# Altium footprint library WR-BHD.PcbLib: 220 footprints (part 13 of 14)
Each footprint in its own frame and in the unit in brackets; x right, y up, seen from the top. Pads: shape width x height; smd on the part's side, far side on the other; paste and mask are expansions set on the pad; w line width, h text height; cw(c..) or ccw(c..) is an arc to the next point about the centre after c.
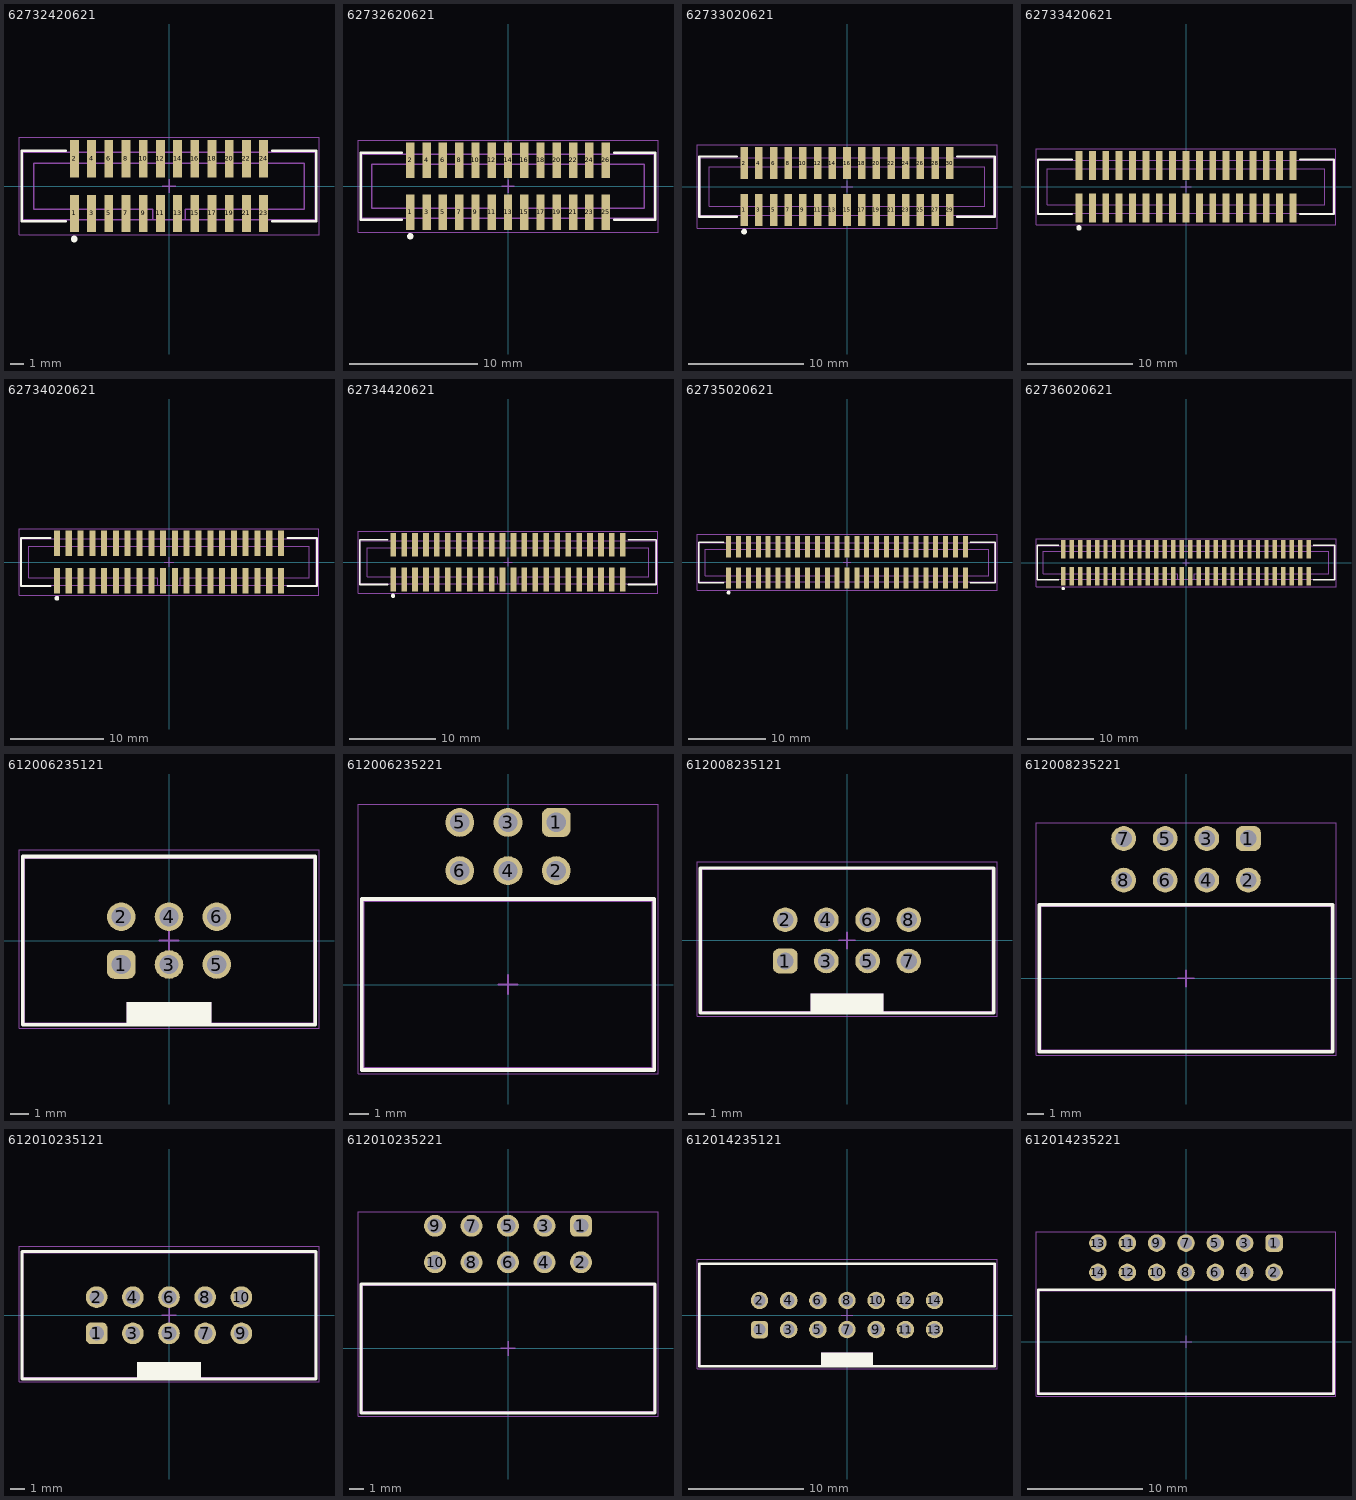
[diagram p12: the footprints below, top view; thin cyan lines are the x and y axes]

## 62732420621 [mm] "Boc Header SMT type, 24p"
height 5.3
pads (24):
  rect 0.65x2.76 smd: 1(-6.985,-2.02) 2(-6.985,2.02) 3(-5.715,-2.02) 4(-5.715,2.02) 5(-4.445,-2.02) 6(-4.445,2.02) 7(-3.175,-2.02) 8(-3.175,2.02) 9(-1.905,-2.02) 10(-1.905,2.02) 11(-0.635,-2.02) 12(-0.635,2.02) 13(0.635,-2.02) 14(0.635,2.02) 15(1.905,-2.02) 16(1.905,2.02) 17(3.175,-2.02) 18(3.175,2.02) 19(4.445,-2.02) 20(4.445,2.02) 21(5.715,-2.02) 22(5.715,2.02) 23(6.985,-2.02) 24(6.985,2.02)
Top Overlay:
  circle w0.25: c-6.995,-3.9 r0.125
  lines w0.2: -7.645,-2.6 -10.87,-2.6 -10.87,2.6 -7.645,2.6 ; 7.645,-2.6 10.87,-2.6 10.87,2.6 7.645,2.6
Top Assembly:
  lines w0.1: -1.2,-2.5 -1.2,-1.7 -9.995,-1.7 -9.995,1.7 9.995,1.7 9.995,-1.7 1.2,-1.7 1.2,-2.5 ; -10.795,-2.5 -10.795,2.5 10.795,2.5 10.795,-2.5 -10.795,-2.5
Top Designator:
  text ".Designator" at -3.647,-0.357 h1
Top 3D Body:
  lines w0.1: -1.2,-2.5 -1.2,-1.7 -9.995,-1.7 -9.995,1.7 9.995,1.7 9.995,-1.7 1.2,-1.7 1.2,-2.5 ; -10.795,-2.5 10.795,-2.5 10.795,2.5 -10.795,2.5 -10.795,-2.5
Top Courtyard:
  lines w0.05: -11.07,-3.6 -11.07,3.6 11.07,3.6 11.07,-3.6 -11.07,-3.6
Top Component Center:
  lines w0.1: -0.5,0 0.5,0 ; 0,-0.5 0,0.5
3D body "62732420621.stp": height 5.3, standoff 0, extent -10.795,-2.755 10.795,2.755

## 62732620621 [mm] "Boc Header SMT type, 26p"
height 5.3
pads (26):
  rect 0.65x2.76 smd: 1(-7.62,-2.02) 2(-7.62,2.02) 3(-6.35,-2.02) 4(-6.35,2.02) 5(-5.08,-2.02) 6(-5.08,2.02) 7(-3.81,-2.02) 8(-3.81,2.02) 9(-2.54,-2.02) 10(-2.54,2.02) 11(-1.27,-2.02) 12(-1.27,2.02) 13(0,-2.02) 14(0,2.02) 15(1.27,-2.02) 16(1.27,2.02) 17(2.54,-2.02) 18(2.54,2.02) 19(3.81,-2.02) 20(3.81,2.02) 21(5.08,-2.02) 22(5.08,2.02) 23(6.35,-2.02) 24(6.35,2.02) 25(7.62,-2.02) 26(7.62,2.02)
Top Overlay:
  circle w0.25: c-7.63,-3.9 r0.125
  lines w0.2: -8.28,-2.6 -11.505,-2.6 -11.505,2.6 -8.28,2.6 ; 8.28,-2.6 11.505,-2.6 11.505,2.6 8.28,2.6
Top Assembly:
  lines w0.1: -1.2,-2.5 -1.2,-1.7 -10.63,-1.7 -10.63,1.7 10.63,1.7 10.63,-1.7 1.2,-1.7 1.2,-2.5 ; -11.43,-2.5 -11.43,2.5 11.43,2.5 11.43,-2.5 -11.43,-2.5
Top Designator:
  text ".Designator" at -3.647,-0.357 h1
Top 3D Body:
  lines w0.1: -1.2,-2.5 -1.2,-1.7 -10.63,-1.7 -10.63,1.7 10.63,1.7 10.63,-1.7 1.2,-1.7 1.2,-2.5 ; -11.43,-2.5 11.43,-2.5 11.43,2.5 -11.43,2.5 -11.43,-2.5
Top Courtyard:
  lines w0.05: -11.705,-3.6 -11.705,3.6 11.705,3.6 11.705,-3.6 -11.705,-3.6
Top Component Center:
  lines w0.1: -0.5,0 0.5,0 ; 0,-0.5 0,0.5
3D body "62732620621.stp": height 5.3, standoff 0, extent -11.43,-2.755 11.43,2.755

## 62733020621 [mm] "Boc Header SMT type, 30p"
height 5.3
pads (30):
  rect 0.65x2.76 smd: 1(-8.89,-2.02) 2(-8.89,2.02) 3(-7.62,-2.02) 4(-7.62,2.02) 5(-6.35,-2.02) 6(-6.35,2.02) 7(-5.08,-2.02) 8(-5.08,2.02) 9(-3.81,-2.02) 10(-3.81,2.02) 11(-2.54,-2.02) 12(-2.54,2.02) 13(-1.27,-2.02) 14(-1.27,2.02) 15(0,-2.02) 16(0,2.02) 17(1.27,-2.02) 18(1.27,2.02) 19(2.54,-2.02) 20(2.54,2.02) 21(3.81,-2.02) 22(3.81,2.02) 23(5.08,-2.02) 24(5.08,2.02) 25(6.35,-2.02) 26(6.35,2.02) 27(7.62,-2.02) 28(7.62,2.02) 29(8.89,-2.02) 30(8.89,2.02)
Top Overlay:
  circle w0.25: c-8.9,-3.9 r0.125
  lines w0.2: -9.55,-2.6 -12.775,-2.6 -12.775,2.6 -9.55,2.6 ; 9.55,-2.6 12.775,-2.6 12.775,2.6 9.55,2.6
Top Assembly:
  lines w0.1: -1.2,-2.5 -1.2,-1.7 -11.9,-1.7 -11.9,1.7 11.9,1.7 11.9,-1.7 1.2,-1.7 1.2,-2.5 ; -12.7,-2.5 12.7,-2.5 12.7,2.5 -12.7,2.5 -12.7,-2.5
Top Designator:
  text ".Designator" at -3.647,-0.357 h1
Top 3D Body:
  lines w0.1: -1.2,-2.5 -1.2,-1.7 -11.9,-1.7 -11.9,1.7 11.9,1.7 11.9,-1.7 1.2,-1.7 1.2,-2.5 ; -12.7,-2.5 -12.7,2.5 12.7,2.5 12.7,-2.5 -12.7,-2.5
Top Courtyard:
  lines w0.05: -12.975,-3.6 12.975,-3.6 12.975,3.6 -12.975,3.6 -12.975,-3.6
Top Component Center:
  lines w0.1: -0.5,0 0.5,0 ; 0,-0.5 0,0.5
3D body "62733020621.stp": height 5.3, standoff 0, extent -12.7,-2.755 12.7,2.755

## 62733420621 [mm] "Boc Header SMT type, 34p"
height 5.3
pads (34):
  rect 0.65x2.76 smd: 1(-10.16,-2.02) 2(-10.16,2.02) 3(-8.89,-2.02) 4(-8.89,2.02) 5(-7.62,-2.02) 6(-7.62,2.02) 7(-6.35,-2.02) 8(-6.35,2.02) 9(-5.08,-2.02) 10(-5.08,2.02) 11(-3.81,-2.02) 12(-3.81,2.02) 13(-2.54,-2.02) 14(-2.54,2.02) 15(-1.27,-2.02) 16(-1.27,2.02) 17(0,-2.02) 18(0,2.02) 19(1.27,-2.02) 20(1.27,2.02) 21(2.54,-2.02) 22(2.54,2.02) 23(3.81,-2.02) 24(3.81,2.02) 25(5.08,-2.02) 26(5.08,2.02) 27(6.35,-2.02) 28(6.35,2.02) 29(7.62,-2.02) 30(7.62,2.02) 31(8.89,-2.02) 32(8.89,2.02) 33(10.16,-2.02) 34(10.16,2.02)
Top Overlay:
  circle w0.25: c-10.17,-3.9 r0.125
  lines w0.2: -10.82,-2.6 -14.045,-2.6 -14.045,2.6 -10.82,2.6 ; 10.82,-2.6 14.045,-2.6 14.045,2.6 10.82,2.6
Top Assembly:
  lines w0.1: -1.2,-2.5 -1.2,-1.7 -13.17,-1.7 -13.17,1.7 13.17,1.7 13.17,-1.7 1.2,-1.7 1.2,-2.5 ; -13.97,-2.5 13.97,-2.5 13.97,2.5 -13.97,2.5 -13.97,-2.5
Top Designator:
  text ".Designator" at -3.647,-0.357 h1
Top 3D Body:
  lines w0.1: -1.2,-2.5 -1.2,-1.7 -13.17,-1.7 -13.17,1.7 13.17,1.7 13.17,-1.7 1.2,-1.7 1.2,-2.5 ; -13.97,-2.5 -13.97,2.5 13.97,2.5 13.97,-2.5 -13.97,-2.5
Top Courtyard:
  lines w0.05: -14.245,-3.6 14.245,-3.6 14.245,3.6 -14.245,3.6 -14.245,-3.6
Top Component Center:
  lines w0.1: -0.5,0 0.5,0 ; 0,-0.5 0,0.5
3D body "62733420621.stp": height 5.3, standoff 0, extent -13.97,-2.755 13.97,2.755

## 62734020621 [mm] "Boc Header SMT type, 40p"
height 5.3
pads (40):
  rect 0.65x2.76 smd: 1(-12.065,-2.02) 2(-12.065,2.02) 3(-10.795,-2.02) 4(-10.795,2.02) 5(-9.525,-2.02) 6(-9.525,2.02) 7(-8.255,-2.02) 8(-8.255,2.02) 9(-6.985,-2.02) 10(-6.985,2.02) 11(-5.715,-2.02) 12(-5.715,2.02) 13(-4.445,-2.02) 14(-4.445,2.02) 15(-3.175,-2.02) 16(-3.175,2.02) 17(-1.905,-2.02) 18(-1.905,2.02) 19(-0.635,-2.02) 20(-0.635,2.02) 21(0.635,-2.02) 22(0.635,2.02) 23(1.905,-2.02) 24(1.905,2.02) 25(3.175,-2.02) 26(3.175,2.02) 27(4.445,-2.02) 28(4.445,2.02) 29(5.715,-2.02) 30(5.715,2.02) 31(6.985,-2.02) 32(6.985,2.02) 33(8.255,-2.02) 34(8.255,2.02) 35(9.525,-2.02) 36(9.525,2.02) 37(10.795,-2.02) 38(10.795,2.02) 39(12.065,-2.02) 40(12.065,2.02)
Top Overlay:
  circle w0.25: c-12.075,-3.9 r0.125
  lines w0.2: -12.725,-2.6 -15.95,-2.6 -15.95,2.6 -12.725,2.6 ; 12.725,-2.6 15.95,-2.6 15.95,2.6 12.725,2.6
Top Assembly:
  lines w0.1: -1.2,-2.5 -1.2,-1.7 -15.075,-1.7 -15.075,1.7 15.075,1.7 15.075,-1.7 1.2,-1.7 1.2,-2.5 ; -15.875,-2.5 -15.875,2.5 15.875,2.5 15.875,-2.5 -15.875,-2.5
Top Designator:
  text ".Designator" at -3.647,-0.357 h1
Top 3D Body:
  lines w0.1: -1.2,-2.5 -1.2,-1.7 -15.075,-1.7 -15.075,1.7 15.075,1.7 15.075,-1.7 1.2,-1.7 1.2,-2.5 ; -15.875,-2.5 15.875,-2.5 15.875,2.5 -15.875,2.5 -15.875,-2.5
Top Courtyard:
  lines w0.05: -16.15,-3.6 -16.15,3.6 16.15,3.6 16.15,-3.6 -16.15,-3.6
Top Component Center:
  lines w0.1: -0.5,0 0.5,0 ; 0,-0.5 0,0.5
3D body "62734020621.stp": height 5.3, standoff 0, extent -15.875,-2.755 15.875,2.755

## 62734420621 [mm] "Boc Header SMT type, 44p"
height 5.3
pads (44):
  rect 0.65x2.76 smd: 1(-13.335,-2.02) 2(-13.335,2.02) 3(-12.065,-2.02) 4(-12.065,2.02) 5(-10.795,-2.02) 6(-10.795,2.02) 7(-9.525,-2.02) 8(-9.525,2.02) 9(-8.255,-2.02) 10(-8.255,2.02) 11(-6.985,-2.02) 12(-6.985,2.02) 13(-5.715,-2.02) 14(-5.715,2.02) 15(-4.445,-2.02) 16(-4.445,2.02) 17(-3.175,-2.02) 18(-3.175,2.02) 19(-1.905,-2.02) 20(-1.905,2.02) 21(-0.635,-2.02) 22(-0.635,2.02) 23(0.635,-2.02) 24(0.635,2.02) 25(1.905,-2.02) 26(1.905,2.02) 27(3.175,-2.02) 28(3.175,2.02) 29(4.445,-2.02) 30(4.445,2.02) 31(5.715,-2.02) 32(5.715,2.02) 33(6.985,-2.02) 34(6.985,2.02) 35(8.255,-2.02) 36(8.255,2.02) 37(9.525,-2.02) 38(9.525,2.02) 39(10.795,-2.02) 40(10.795,2.02) 41(12.065,-2.02) 42(12.065,2.02) 43(13.335,-2.02) 44(13.335,2.02)
Top Overlay:
  circle w0.25: c-13.345,-3.9 r0.125
  lines w0.2: -13.995,-2.6 -17.22,-2.6 -17.22,2.6 -13.995,2.6 ; 13.995,-2.6 17.22,-2.6 17.22,2.6 13.995,2.6
Top Assembly:
  lines w0.1: -1.2,-2.5 -1.2,-1.7 -16.345,-1.7 -16.345,1.7 16.345,1.7 16.345,-1.7 1.2,-1.7 1.2,-2.5 ; -17.145,-2.5 -17.145,2.5 17.145,2.5 17.145,-2.5 -17.145,-2.5
Top Designator:
  text ".Designator" at -3.647,-0.357 h1
Top 3D Body:
  lines w0.1: -1.2,-2.5 -1.2,-1.7 -16.345,-1.7 -16.345,1.7 16.345,1.7 16.345,-1.7 1.2,-1.7 1.2,-2.5 ; -17.145,-2.5 17.145,-2.5 17.145,2.5 -17.145,2.5 -17.145,-2.5
Top Courtyard:
  lines w0.05: -17.42,-3.6 -17.42,3.6 17.42,3.6 17.42,-3.6 -17.42,-3.6
Top Component Center:
  lines w0.1: -0.5,0 0.5,0 ; 0,-0.5 0,0.5
3D body "62734420621.stp": height 5.3, standoff 0, extent -17.145,-2.755 17.145,2.755

## 62735020621 [mm] "Boc Header SMT type, 50p"
height 5.3
pads (50):
  rect 0.65x2.76 smd: 1(-15.24,-2.02) 2(-15.24,2.02) 3(-13.97,-2.02) 4(-13.97,2.02) 5(-12.7,-2.02) 6(-12.7,2.02) 7(-11.43,-2.02) 8(-11.43,2.02) 9(-10.16,-2.02) 10(-10.16,2.02) 11(-8.89,-2.02) 12(-8.89,2.02) 13(-7.62,-2.02) 14(-7.62,2.02) 15(-6.35,-2.02) 16(-6.35,2.02) 17(-5.08,-2.02) 18(-5.08,2.02) 19(-3.81,-2.02) 20(-3.81,2.02) 21(-2.54,-2.02) 22(-2.54,2.02) 23(-1.27,-2.02) 24(-1.27,2.02) 25(0,-2.02) 26(0,2.02) 27(1.27,-2.02) 28(1.27,2.02) 29(2.54,-2.02) 30(2.54,2.02) 31(3.81,-2.02) 32(3.81,2.02) 33(5.08,-2.02) 34(5.08,2.02) 35(6.35,-2.02) 36(6.35,2.02) 37(7.62,-2.02) 38(7.62,2.02) 39(8.89,-2.02) 40(8.89,2.02) 41(10.16,-2.02) 42(10.16,2.02) 43(11.43,-2.02) 44(11.43,2.02) 45(12.7,-2.02) 46(12.7,2.02) 47(13.97,-2.02) 48(13.97,2.02) 49(15.24,-2.02) 50(15.24,2.02)
Top Overlay:
  circle w0.25: c-15.25,-3.9 r0.125
  lines w0.2: -15.9,-2.6 -19.125,-2.6 -19.125,2.6 -15.9,2.6 ; 15.9,-2.6 19.125,-2.6 19.125,2.6 15.9,2.6
Top Assembly:
  lines w0.1: -1.2,-2.5 -1.2,-1.7 -18.25,-1.7 -18.25,1.7 18.25,1.7 18.25,-1.7 1.2,-1.7 1.2,-2.5 ; -19.05,-2.5 -19.05,2.5 19.05,2.5 19.05,-2.5 -19.05,-2.5
Top Designator:
  text ".Designator" at -3.647,-0.357 h1
Top 3D Body:
  lines w0.1: -1.2,-2.5 -1.2,-1.7 -18.25,-1.7 -18.25,1.7 18.25,1.7 18.25,-1.7 1.2,-1.7 1.2,-2.5 ; -19.05,-2.5 19.05,-2.5 19.05,2.5 -19.05,2.5 -19.05,-2.5
Top Courtyard:
  lines w0.05: -19.325,-3.6 -19.325,3.6 19.325,3.6 19.325,-3.6 -19.325,-3.6
Top Component Center:
  lines w0.1: -0.5,0 0.5,0 ; 0,-0.5 0,0.5
3D body "62735020621.stp": height 5.3, standoff 0, extent -19.05,-2.755 19.05,2.755

## 62736020621 [mm] "Boc Header SMT type, 60p"
height 5.3
pads (60):
  rect 0.65x2.76 smd: 1(-18.415,-2.02) 2(-18.415,2.02) 3(-17.145,-2.02) 4(-17.145,2.02) 5(-15.875,-2.02) 6(-15.875,2.02) 7(-14.605,-2.02) 8(-14.605,2.02) 9(-13.335,-2.02) 10(-13.335,2.02) 11(-12.065,-2.02) 12(-12.065,2.02) 13(-10.795,-2.02) 14(-10.795,2.02) 15(-9.525,-2.02) 16(-9.525,2.02) 17(-8.255,-2.02) 18(-8.255,2.02) 19(-6.985,-2.02) 20(-6.985,2.02) 21(-5.715,-2.02) 22(-5.715,2.02) 23(-4.445,-2.02) 24(-4.445,2.02) 25(-3.175,-2.02) 26(-3.175,2.02) 27(-1.905,-2.02) 28(-1.905,2.02) 29(-0.635,-2.02) 30(-0.635,2.02) 31(0.635,-2.02) 32(0.635,2.02) 33(1.905,-2.02) 34(1.905,2.02) 35(3.175,-2.02) 36(3.175,2.02) 37(4.445,-2.02) 38(4.445,2.02) 39(5.715,-2.02) 40(5.715,2.02) 41(6.985,-2.02) 42(6.985,2.02) 43(8.255,-2.02) 44(8.255,2.02) 45(9.525,-2.02) 46(9.525,2.02) 47(10.795,-2.02) 48(10.795,2.02) 49(12.065,-2.02) 50(12.065,2.02) 51(13.335,-2.02) 52(13.335,2.02) 53(14.605,-2.02) 54(14.605,2.02) 55(15.875,-2.02) 56(15.875,2.02) 57(17.145,-2.02) 58(17.145,2.02) 59(18.415,-2.02) 60(18.415,2.02)
Top Overlay:
  circle w0.25: c-18.425,-3.9 r0.125
  lines w0.2: -19.075,-2.6 -22.3,-2.6 -22.3,2.6 -19.075,2.6 ; 19.075,-2.6 22.3,-2.6 22.3,2.6 19.075,2.6
Top Assembly:
  lines w0.1: -1.2,-2.5 -1.2,-1.7 -21.425,-1.7 -21.425,1.7 21.425,1.7 21.425,-1.7 1.2,-1.7 1.2,-2.5 ; -22.225,-2.5 22.225,-2.5 22.225,2.5 -22.225,2.5 -22.225,-2.5
Top Designator:
  text ".Designator" at -3.647,-0.357 h1
Top 3D Body:
  lines w0.1: -1.2,-2.5 -1.2,-1.7 -21.425,-1.7 -21.425,1.7 21.425,1.7 21.425,-1.7 1.2,-1.7 1.2,-2.5 ; -22.225,-2.5 -22.225,2.5 22.225,2.5 22.225,-2.5 -22.225,-2.5
Top Courtyard:
  lines w0.05: -22.5,-3.6 22.5,-3.6 22.5,3.6 -22.5,3.6 -22.5,-3.6
Top Component Center:
  lines w0.1: -0.5,0 0.5,0 ; 0,-0.5 0,0.5
3D body "62736020621.stp": height 5.3, standoff 0, extent -22.225,-2.755 22.225,2.755

## 612006235121 [mm] "6 pins, straight, gold plating"
height 9.05
pads (6):
  rrect50% 1.52x1.52 hole 1.02: 1(-2.54,-1.27)
  round 1.52 hole 1.02: 2(-2.54,1.27) 3(0,-1.27) 4(0,1.27) 5(2.54,-1.27) 6(2.54,1.27)
Top Overlay:
  rectangle: -2.25,-4.475 2.25,-3.275
  lines w0.2: -7.785,-4.475 7.785,-4.475 7.785,4.475 -7.785,4.475 -7.785,-4.475
Top Assembly:
  rectangle: -2.25,-4.4 2.25,-3.275
  lines w0.1: -7.71,-4.4 7.71,-4.4 7.71,4.4 -7.71,4.4 -7.71,-4.4
Top Designator:
  text ".Designator" at -3.647,-0.357 h1
Top 3D Body:
  rectangle: -2.25,-4.4 2.25,-3.275
  lines w0.1: -7.71,-4.4 -7.71,4.4 7.71,4.4 7.71,-4.4 -7.71,-4.4
Top Courtyard:
  lines w0.05: -7.985,-4.675 7.985,-4.675 7.985,4.85 -7.985,4.85 -7.985,-4.675
Top Component Center:
  lines w0.1: -0.5,0 0.5,0 ; 0,-0.5 0,0.5
3D body "612006235121.stp": height 9.1, standoff -2.9, extent -7.64,-4.4 7.64,4.65

## 612006235221 [mm] "6 pins, right angled, gold plating, High Temperature"
height 9.05
pads (6):
  rrect50% 1.52x1.52 hole 1.02: 1(2.54,8.54)
  round 1.52 hole 1.02: 2(2.54,6) 3(0,8.54) 4(0,6) 5(-2.54,8.54) 6(-2.54,6)
Top Overlay:
  lines w0.2: -7.7,-4.5 -7.7,4.5 7.7,4.5 7.7,-4.5 -7.7,-4.5
Top Assembly:
  lines w0.1: -7.6,-4.4 7.6,-4.4 7.6,4.4 -7.6,4.4 -7.6,-4.4
Top Designator:
  text ".Designator" at -3.647,-0.357 h1
Top 3D Body:
  lines w0.1: -7.6,-4.4 -7.6,4.4 7.6,4.4 7.6,-4.4 -7.6,-4.4
Top Courtyard:
  lines w0.05: -7.9,-4.7 7.9,-4.7 7.9,9.5 -7.9,9.5 -7.9,-4.7
Top Component Center:
  lines w0.1: -0.5,0 0.5,0 ; 0,-0.5 0,0.5
3D body "612006235221 (rev1).stp": height 9.1, standoff -3.1, extent -7.64,-4.4 7.64,8.86

## 612008235121 [mm] "8 pins, straight, gold plating"
height 9.05
pads (8):
  rrect50% 1.52x1.52 hole 1.02: 1(-3.81,-1.27)
  round 1.52 hole 1.02: 2(-3.81,1.27) 3(-1.27,-1.27) 4(-1.27,1.27) 5(1.27,-1.27) 6(1.27,1.27) 7(3.81,-1.27) 8(3.81,1.27)
Top Overlay:
  rectangle: -2.25,-4.475 2.25,-3.275
  lines w0.2: -9.055,-4.475 9.055,-4.475 9.055,4.475 -9.055,4.475 -9.055,-4.475
Top Assembly:
  rectangle: -2.25,-4.4 2.25,-3.275
  lines w0.1: -8.98,-4.4 8.98,-4.4 8.98,4.4 -8.98,4.4 -8.98,-4.4
Top Designator:
  text ".Designator" at -3.647,-0.357 h1
Top 3D Body:
  rectangle: -2.25,-4.4 2.25,-3.275
  lines w0.1: -8.98,-4.4 -8.98,4.4 8.98,4.4 8.98,-4.4 -8.98,-4.4
Top Courtyard:
  lines w0.05: -9.255,-4.675 9.255,-4.675 9.255,4.85 -9.255,4.85 -9.255,-4.675
Top Component Center:
  lines w0.1: -0.5,0 0.5,0 ; 0,-0.5 0,0.5
3D body "612008235121.stp": height 9.1, standoff -2.9, extent -8.91,-4.4 8.91,4.65

## 612008235221 [mm] "8 pins, right angled, gold plating, High Temperature"
height 9.05
pads (8):
  rrect50% 1.52x1.52 hole 1.02: 1(3.81,8.54)
  round 1.52 hole 1.02: 2(3.81,6) 3(1.27,8.54) 4(1.27,6) 5(-1.27,8.54) 6(-1.27,6) 7(-3.81,8.54) 8(-3.81,6)
Top Overlay:
  lines w0.2: -8.97,-4.5 -8.97,4.5 8.97,4.5 8.97,-4.5 -8.97,-4.5
Top Assembly:
  lines w0.1: -8.87,-4.4 8.87,-4.4 8.87,4.4 -8.87,4.4 -8.87,-4.4
Top Designator:
  text ".Designator" at -3.647,-0.357 h1
Top 3D Body:
  lines w0.1: -8.87,-4.4 -8.87,4.4 8.87,4.4 8.87,-4.4 -8.87,-4.4
Top Courtyard:
  lines w0.05: -9.17,-4.7 9.17,-4.7 9.17,9.5 -9.17,9.5 -9.17,-4.7
Top Component Center:
  lines w0.1: -0.5,0 0.5,0 ; 0,-0.5 0,0.5
3D body "612008235221.stp": height 9.1, standoff -3.1, extent -8.91,-4.4 8.91,8.86

## 612010235121 [mm] "10 pins, straight, gold plating"
height 9.05
pads (10):
  rrect50% 1.52x1.52 hole 1.02: 1(-5.08,-1.27)
  round 1.52 hole 1.02: 2(-5.08,1.27) 3(-2.54,-1.27) 4(-2.54,1.27) 5(0,-1.27) 6(0,1.27) 7(2.54,-1.27) 8(2.54,1.27) 9(5.08,-1.27) 10(5.08,1.27)
Top Overlay:
  rectangle: -2.25,-4.475 2.25,-3.275
  lines w0.2: -10.325,-4.475 -10.325,4.475 10.325,4.475 10.325,-4.475 -10.325,-4.475
Top Assembly:
  rectangle: -2.25,-4.4 2.25,-3.275
  lines w0.1: -10.25,-4.4 -10.25,4.4 10.25,4.4 10.25,-4.4 -10.25,-4.4
Top Designator:
  text ".Designator" at -3.647,-0.357 h1
Top 3D Body:
  rectangle: -2.25,-4.4 2.25,-3.275
  lines w0.1: -10.25,-4.4 10.25,-4.4 10.25,4.4 -10.25,4.4 -10.25,-4.4
Top Courtyard:
  lines w0.05: -10.525,-4.675 -10.525,4.85 10.525,4.85 10.525,-4.675 -10.525,-4.675
Top Component Center:
  lines w0.1: -0.5,0 0.5,0 ; 0,-0.5 0,0.5
3D body "612010235121.stp": height 9.1, standoff -2.9, extent -10.18,-4.4 10.18,4.65

## 612010235221 [mm] "10 pins, right angled, gold plating, High Temperature"
height 9.05
pads (10):
  rrect50% 1.52x1.52 hole 1.02: 1(5.08,8.54)
  round 1.52 hole 1.02: 2(5.08,6) 3(2.54,8.54) 4(2.54,6) 5(0,8.54) 6(0,6) 7(-2.54,8.54) 8(-2.54,6) 9(-5.08,8.54) 10(-5.08,6)
Top Overlay:
  lines w0.2: -10.24,-4.5 -10.24,4.5 10.24,4.5 10.24,-4.5 -10.24,-4.5
Top Assembly:
  lines w0.1: -10.14,-4.4 10.14,-4.4 10.14,4.4 -10.14,4.4 -10.14,-4.4
Top Designator:
  text ".Designator" at -3.647,-0.357 h1
Top 3D Body:
  lines w0.1: -10.14,-4.4 -10.14,4.4 10.14,4.4 10.14,-4.4 -10.14,-4.4
Top Courtyard:
  lines w0.05: -10.44,-4.7 10.44,-4.7 10.44,9.5 -10.44,9.5 -10.44,-4.7
Top Component Center:
  lines w0.1: -0.5,0 0.5,0 ; 0,-0.5 0,0.5
3D body "612010235221.stp": height 9.1, standoff -3.1, extent -10.18,-4.4 10.18,8.86

## 612014235121 [mm] "14 pins, straight, gold plating"
height 9.05
pads (14):
  rrect50% 1.52x1.52 hole 1.02: 1(-7.62,-1.27)
  round 1.52 hole 1.02: 2(-7.62,1.27) 3(-5.08,-1.27) 4(-5.08,1.27) 5(-2.54,-1.27) 6(-2.54,1.27) 7(0,-1.27) 8(0,1.27) 9(2.54,-1.27) 10(2.54,1.27) 11(5.08,-1.27) 12(5.08,1.27) 13(7.62,-1.27) 14(7.62,1.27)
Top Overlay:
  rectangle: -2.25,-4.475 2.25,-3.275
  lines w0.2: -12.865,-4.475 12.865,-4.475 12.865,4.475 -12.865,4.475 -12.865,-4.475
Top Assembly:
  rectangle: -2.25,-4.4 2.25,-3.275
  lines w0.1: -12.79,-4.4 12.79,-4.4 12.79,4.4 -12.79,4.4 -12.79,-4.4
Top Designator:
  text ".Designator" at -3.647,-0.357 h1
Top 3D Body:
  rectangle: -2.25,-4.4 2.25,-3.275
  lines w0.1: -12.79,-4.4 -12.79,4.4 12.79,4.4 12.79,-4.4 -12.79,-4.4
Top Courtyard:
  lines w0.05: -13.065,-4.675 13.065,-4.675 13.065,4.85 -13.065,4.85 -13.065,-4.675
Top Component Center:
  lines w0.1: -0.5,0 0.5,0 ; 0,-0.5 0,0.5
3D body "612014235121.stp": height 9.1, standoff -2.9, extent -12.72,-4.4 12.72,4.65

## 612014235221 [mm] "14 pins, right angled, gold plating, High Temperature"
height 9.05
pads (14):
  rrect50% 1.52x1.52 hole 1.02: 1(7.62,8.54)
  round 1.52 hole 1.02: 2(7.62,6) 3(5.08,8.54) 4(5.08,6) 5(2.54,8.54) 6(2.54,6) 7(0,8.54) 8(0,6) 9(-2.54,8.54) 10(-2.54,6) 11(-5.08,8.54) 12(-5.08,6) 13(-7.62,8.54) 14(-7.62,6)
Top Overlay:
  lines w0.2: -12.78,-4.5 12.78,-4.5 12.78,4.5 -12.78,4.5 -12.78,-4.5
Top Assembly:
  lines w0.1: -12.68,-4.4 -12.68,4.4 12.68,4.4 12.68,-4.4 -12.68,-4.4
Top Designator:
  text ".Designator" at -3.647,-0.357 h1
Top 3D Body:
  lines w0.1: -12.68,-4.4 12.68,-4.4 12.68,4.4 -12.68,4.4 -12.68,-4.4
Top Courtyard:
  lines w0.05: -12.98,-4.7 -12.98,9.5 12.98,9.5 12.98,-4.7 -12.98,-4.7
Top Component Center:
  lines w0.1: -0.5,0 0.5,0 ; 0,-0.5 0,0.5
3D body "612014235221.stp": height 9.1, standoff -3.1, extent -12.72,-4.4 12.72,8.86